# EAGLE library part TB67S249FTG,EL (library TB67S249FTG_EL)
Motor / Motion / Ignition Controllers & Drivers Stepping Motor Driver IC 50V 4.5A Source: Datasheet <http://toshiba.semicon-storage.com/info/docget.jsp?did=58560&prodName=TB67S249FTG>
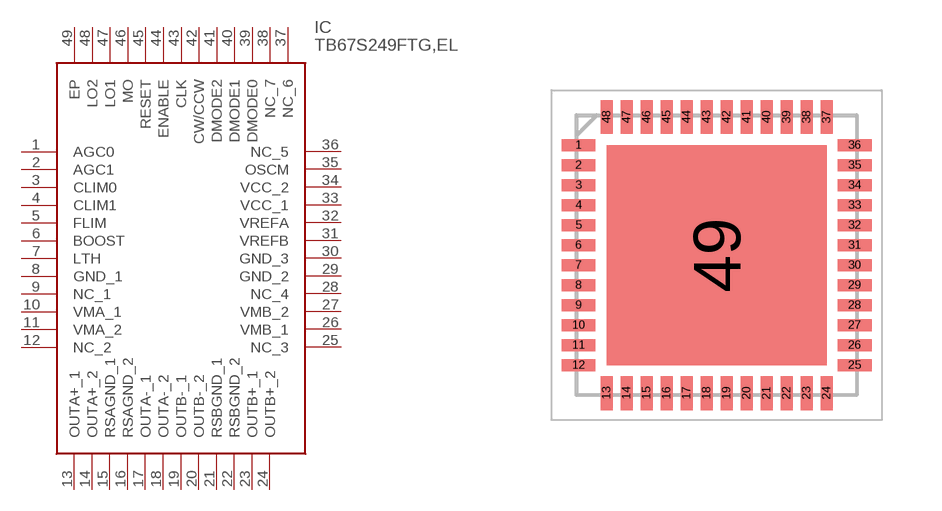
[diagram p0: symbol with the pads of QFN50P700X700X100-49N; footprint QFN50P700X700X100-49N]

Designator prefix IC

## TB67S249FTG,EL (Description: Motor / Motion / Ignition Controllers & Drivers Stepping Motor Driver IC 50V 4.5A; Height: 1mm; Manufacturer_Name: Toshiba; Manufacturer_Part_Number: TB67S249FTG,EL; Mouser_Part_Number: 757-TB67S249FTGEL; Mouser_Price-Stock: https://www.mouser.co.uk/ProductDetail/Toshiba/TB67S249FTGEL?qs=1mbolxNpo8fmTK3GoCnwKw%3D%3D)  [QFN50P700X700X100-49N]
1  AGC0
2  AGC1
3  CLIM0
4  CLIM1
5  FLIM
6  BOOST
7  LTH
8  GND_1
9  NC_1
10  VMA_1
11  VMA_2
12  NC_2
13  OUTA+_1
14  OUTA+_2
15  RSAGND_1
16  RSAGND_2
17  OUTA-_1
18  OUTA-_2
19  OUTB-_1
20  OUTB-_2
21  RSBGND_1
22  RSBGND_2
23  OUTB+_1
24  OUTB+_2
25  NC_3
26  VMB_1
27  VMB_2
28  NC_4
29  GND_2
30  GND_3
31  VREFB
32  VREFA
33  VCC_1
34  VCC_2
35  OSCM
36  NC_5
37  NC_6
38  NC_7
39  DMODE0
40  DMODE1
41  DMODE2
42  CW/CCW
43  CLK
44  ENABLE
45  RESET
46  MO
47  LO1
48  LO2
49  EP

## Footprint QFN50P700X700X100-49N (pad centres in mm)
P-VQFN48-0707-0.50-004
smd 0.85 x 0.3: 1 -3.45,2.75; 2 -3.45,2.25; 3 -3.45,1.75; 4 -3.45,1.25; 5 -3.45,0.75; 6 -3.45,0.25; 7 -3.45,-0.25; 8 -3.45,-0.75; 9 -3.45,-1.25; 10 -3.45,-1.75; 11 -3.45,-2.25; 12 -3.45,-2.75; 25 3.45,-2.75; 26 3.45,-2.25; 27 3.45,-1.75; 28 3.45,-1.25; 29 3.45,-0.75; 30 3.45,-0.25; 31 3.45,0.25; 32 3.45,0.75; 33 3.45,1.25; 34 3.45,1.75; 35 3.45,2.25; 36 3.45,2.75
smd 0.3 x 0.85: 13 -2.75,-3.45; 14 -2.25,-3.45; 15 -1.75,-3.45; 16 -1.25,-3.45; 17 -0.75,-3.45; 18 -0.25,-3.45; 19 0.25,-3.45; 20 0.75,-3.45; 21 1.25,-3.45; 22 1.75,-3.45; 23 2.25,-3.45; 24 2.75,-3.45; 37 2.75,3.45; 38 2.25,3.45; 39 1.75,3.45; 40 1.25,3.45; 41 0.75,3.45; 42 0.25,3.45; 43 -0.25,3.45; 44 -0.75,3.45; 45 -1.25,3.45; 46 -1.75,3.45; 47 -2.25,3.45; 48 -2.75,3.45
smd 5.5 x 5.5: 49 0,0